# Altium footprint library WE-RJ45 LAN.PcbLib: 101 footprints (part 2 of 7)
Each footprint in its own frame and in the unit in brackets; x right, y up, seen from the top. Pads: shape width x height; smd on the part's side, far side on the other; paste and mask are expansions set on the pad; w line width, h text height; cw(c..) or ccw(c..) is an arc to the next point about the centre after c.
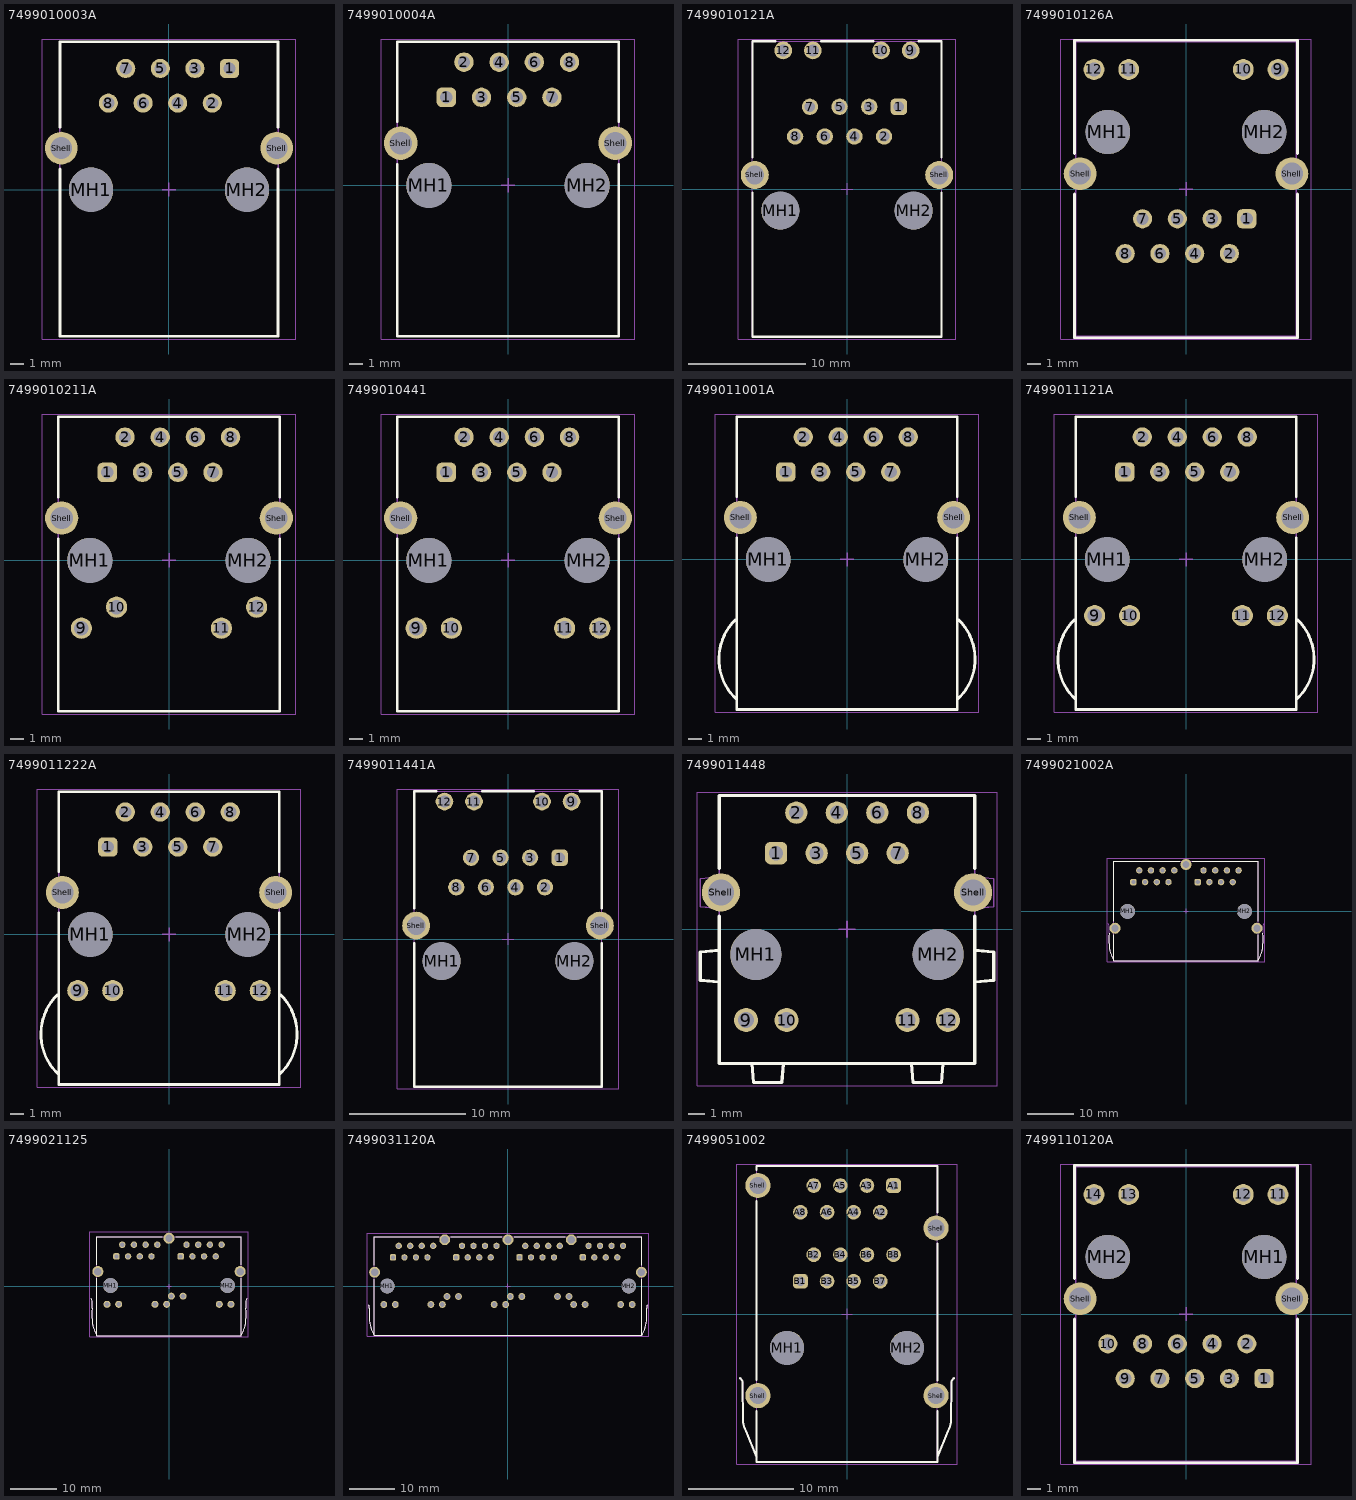
[diagram p1: the footprints below, top view; thin cyan lines are the x and y axes]

## 7499010003A [mm] "LAN Transformer, body 21.84x16.13mm"
height 13.74
pads (12):
  rrect50% 1.4x1.4 hole 0.89: 1(4.445,8.89)
  round 1.4 hole 0.89: 2(3.175,6.35) 3(1.905,8.89) 4(0.635,6.35) 5(-0.635,8.89) 6(-1.905,6.35) 7(-3.175,8.89) 8(-4.445,6.35)
  round 3.25 hole 3.25 unplated: MH1(-5.715,0) MH2(5.715,0)
  round 2.4 hole 1.6: Shell(-7.9,3.05) Shell(7.9,3.05)
Top Overlay:
  lines w0.2: -8,1.52 -8,-10.75 8,-10.75 8,1.52 ; -8,4.58 -8,10.85 8,10.85 8,4.58
Top Assembly:
  lines w0.1: -8,-10.75 -8,10.85 8,10.85 8,-10.75 -8,-10.75
Top Designator:
  text ".Designator" at -3.647,-0.357 h1
Top 3D Body:
  lines w0.1: -8,-10.75 -8,10.85 8,10.85 8,-10.75 -8,-10.75
Top Courtyard:
  lines w0.05: -9.3,-10.95 9.3,-10.95 9.3,11.05 -9.3,11.05 -9.3,-10.95
Top Component Center:
  lines w0.1: -0.5,0 0.5,0 ; 0,-0.5 0,0.5
3D body "7499010003A.stp": height 13.72, standoff -2.88, extent -8.1,-10.75 8.1,10.85

## 7499010004A [mm] "RJ45 LAN Transformer, body 16.00 x 21.25 mm"
height 13.5
pads (12):
  rrect50% 1.4x1.4 hole 0.89: 1(-4.45,6.35)
  round 1.4 hole 0.89: 2(-3.18,8.89) 3(-1.91,6.35) 4(-0.64,8.89) 5(0.63,6.35) 6(1.9,8.89) 7(3.17,6.35) 8(4.44,8.89)
  round 3.25 hole 3.25 unplated: MH1(-5.715,0) MH2(5.715,0)
  round 2.43 hole 1.63: Shell(-7.745,3.05) Shell(7.745,3.05)
Top Overlay:
  lines w0.2: -8,1.5 -8,-10.89 8,-10.89 8,1.5 ; -8,4.6 -8,10.36 8,10.36 8,4.6
Top Assembly:
  lines w0.1: -8,-10.89 -8,10.36 8,10.36 8,-10.89 -8,-10.89
Top Designator:
  text ".Designator" at -3.647,-0.357 h1
Top 3D Body:
  lines w0.1: -8,-10.89 -8,10.36 8,10.36 8,-10.89 -8,-10.89
Top Courtyard:
  lines w0.05: -9.16,-11.09 -9.16,10.56 9.16,10.56 9.16,-11.09 -9.16,-11.09
Top Component Center:
  lines w0.1: -0.5,0 0.5,0 ; 0,-0.5 0,0.5
3D body "7499010004A.stp": height 13.6, standoff -3.5, extent -8.15,-10.89 8.15,10.36

## 7499010121A [mm] "LAN Transformer, body 25.3x16.2mm"
height 13.5
pads (16):
  rrect50% 1.4x1.4 hole 0.9: 1(4.445,7.04)
  round 1.4 hole 0.9: 2(3.175,4.5) 3(1.905,7.04) 4(0.635,4.5) 5(-0.635,7.04) 6(-1.905,4.5) 7(-3.175,7.04) 8(-4.445,4.5)
  round 1.52 hole 1.02: 9(5.465,11.87) 10(2.925,11.87) 11(-2.925,11.87) 12(-5.465,11.87)
  round 3.25 hole 3.25 unplated: MH1(-5.715,-1.85) MH2(5.715,-1.85)
  round 2.4 hole 1.6: Shell(-7.9,1.2) Shell(7.9,1.2)
Top Overlay:
  lines w0.2: -8.1,-0.3 -8.1,-12.65 8.1,-12.65 8.1,-0.3 ; -8.1,2.7 -8.1,12.65 -6.15,12.65 ; -2.2,12.65 2.24,12.65 ; 6.15,12.65 8.1,12.65 8.1,2.7
Top Assembly:
  lines w0.1: -8.1,-12.65 -8.1,12.65 8.1,12.65 8.1,-12.65 -8.1,-12.65
Top Designator:
  text ".Designator" at -3.647,-0.357 h1
Top 3D Body:
  lines w0.1: -8.1,-12.65 -8.1,12.65 8.1,12.65 8.1,-12.65 -8.1,-12.65
Top Courtyard:
  lines w0.05: -9.3,-12.85 9.3,-12.85 9.3,12.85 -9.3,12.85 -9.3,-12.85
Top Component Center:
  lines w0.1: -0.5,0 0.5,0 ; 0,-0.5 0,0.5
3D body "7499010121A.stp": height 13.61, standoff -3.79, extent -8.2,-12.65 8.2,12.65

## 7499010126A [mm] "LAN Transformer, body 21.54 x 16.10 mm"
height 16.65
pads (16):
  rrect50% 1.4x1.4 hole 0.9: 1(4.445,-2.18)
  round 1.4 hole 0.9: 2(3.175,-4.72) 3(1.905,-2.18) 4(0.635,-4.72) 5(-0.635,-2.18) 6(-1.905,-4.72) 7(-3.175,-2.18) 8(-4.445,-4.72)
  round 1.52 hole 1.02: 9(6.73,8.74) 10(4.19,8.74) 11(-4.19,8.74) 12(-6.73,8.74)
  round 3.25 hole 3.25 unplated: MH1(-5.715,4.17) MH2(5.715,4.17)
  round 2.4 hole 1.6: Shell(-7.745,1.12) Shell(7.745,1.12)
Top Overlay:
  lines w0.2: -8.15,-0.36 -8.15,-10.87 8.15,-10.87 8.15,-0.36 ; -8.15,2.6 -8.15,10.87 8.15,10.87 8.15,2.6
Top Assembly:
  lines w0.1: -8.05,-10.77 -8.05,10.77 8.05,10.77 8.05,-10.77 -8.05,-10.77
Top Designator:
  text ".Designator" at -3.647,-0.357 h1
Top 3D Body:
  lines w0.1: -8.05,-10.77 -8.05,10.77 8.05,10.77 8.05,-10.77 -8.05,-10.77
Top Courtyard:
  lines w0.05: -9.145,-10.97 -9.145,10.97 9.145,10.97 9.145,-10.97 -9.145,-10.97
Top Component Center:
  lines w0.1: -0.5,0 0.5,0 ; 0,-0.5 0,0.5
3D body "7499010126A.stp": height 16.69, standoff -3.3, extent -8.34,-10.77 8.34,10.77

## 7499010211A [mm] "Integrated RJ45 Transformer, THT, body 16.00 x 21.25 mm"
height 13.5
pads (16):
  rrect50% 1.4x1.4 hole 0.9: 1(-4.445,6.35)
  round 1.4 hole 0.9: 2(-3.175,8.89) 3(-1.905,6.35) 4(-0.635,8.89) 5(0.635,6.35) 6(1.905,8.89) 7(3.175,6.35) 8(4.445,8.89)
  round 1.53 hole 1.03: 9(-6.325,-4.9) 10(-3.785,-3.38) 11(3.785,-4.9) 12(6.325,-3.38)
  round 3.25 hole 3.25 unplated: MH1(-5.715,0) MH2(5.715,0)
  round 2.4 hole 1.6: Shell(-7.745,3.05) Shell(7.745,3.05)
Top Overlay:
  lines w0.2: -8,1.55 -8,-10.89 8,-10.89 8,1.55 ; -8,4.55 -8,10.36 8,10.36 8,4.55
Top Assembly:
  lines w0.1: -8,-10.89 8,-10.89 8,10.36 -8,10.36 -8,-10.89
Top Designator:
  text ".Designator" at -3.647,-0.357 h1
Top 3D Body:
  lines w0.1: -8,-10.89 8,-10.89 8,10.36 -8,10.36 -8,-10.89
Top Courtyard:
  lines w0.05: -9.145,-11.09 -9.145,10.56 9.145,10.56 9.145,-11.09 -9.145,-11.09
Top Component Center:
  lines w0.1: -0.5,0 0.5,0 ; 0,-0.5 0,0.5
3D body "7499010211A.stp": height 13.5, standoff -3.6, extent -8.15,-10.89 8.15,10.36

## 7499010441 [mm] "Integrated RJ45 Transformer, THT, body 16.00 x 21.25 mm"
height 13.5
pads (16):
  rrect50% 1.4x1.4 hole 0.9: 1(-4.445,6.35)
  round 1.4 hole 0.9: 2(-3.175,8.89) 3(-1.905,6.35) 4(-0.635,8.89) 5(0.635,6.35) 6(1.905,8.89) 7(3.175,6.35) 8(4.445,8.89)
  round 1.53 hole 1.03: 9(-6.625,-4.9) 10(-4.085,-4.9) 11(4.085,-4.9) 12(6.625,-4.9)
  round 3.25 hole 3.25 unplated: MH1(-5.715,0) MH2(5.715,0)
  round 2.4 hole 1.6: Shell(-7.745,3.05) Shell(7.745,3.05)
Top Overlay:
  lines w0.2: -8,1.55 -8,-10.89 8,-10.89 8,1.55 ; -8,4.55 -8,10.36 8,10.36 8,4.55
Top Assembly:
  lines w0.1: -8,-10.89 -8,10.36 8,10.36 8,-10.89 -8,-10.89
Top Designator:
  text ".Designator" at -3.647,-0.357 h1
Top 3D Body:
  lines w0.1: -8,-10.89 -8,10.36 8,10.36 8,-10.89 -8,-10.89
Top Courtyard:
  lines w0.05: -9.145,-11.09 9.145,-11.09 9.145,10.56 -9.145,10.56 -9.145,-11.09
Top Component Center:
  lines w0.1: -0.5,0 0.5,0 ; 0,-0.5 0,0.5
3D body "7499010441.stp": height 13.5, standoff -3.6, extent -8.15,-10.89 8.15,10.36

## 7499011001A [mm] "Integrated RJ45 Transformer, THT, body 16.00 x 21.25 mm"
height 13.5
pads (12):
  rrect50% 1.4x1.4 hole 0.9: 1(-4.445,6.35)
  round 1.4 hole 0.9: 2(-3.175,8.89) 3(-1.905,6.35) 4(-0.635,8.89) 5(0.635,6.35) 6(1.905,8.89) 7(3.175,6.35) 8(4.445,8.89)
  round 3.25 hole 3.25 unplated: MH1(-5.715,0) MH2(5.715,0)
  round 2.4 hole 1.6: Shell(-7.745,3.05) Shell(7.745,3.05)
Top Overlay:
  lines w0.2: -8.099,-4.377 ccw(c-5.31,-7.23) -8.001,-10.176 ; -8,1.55 -8,-10.89 8,-10.89 8,1.55 ; -8,4.55 -8,10.36 8,10.36 8,4.55 ; 8.001,-10.176 ccw(c5.31,-7.23) 8.099,-4.377
Top Assembly:
  lines w0.1: -8.099,-4.377 ccw(c-5.31,-7.23) -8.001,-10.176 ; 8.001,-10.176 ccw(c5.31,-7.23) 8.099,-4.377 ; -8,-10.89 8,-10.89 8,10.36 -8,10.36 -8,-10.89
Top Designator:
  text ".Designator" at -3.647,-0.357 h1
Top 3D Body:
  lines w0.1: -8.099,-4.377 ccw(c-5.31,-7.23) -8.001,-10.176 ; 8.001,-10.176 ccw(c5.31,-7.23) 8.099,-4.377 ; -8,-10.89 8,-10.89 8,10.36 -8,10.36 -8,-10.89
Top Courtyard:
  lines w0.05: -9.548,-11.09 9.548,-11.09 9.548,10.56 -9.548,10.56 -9.548,-11.09
Top Component Center:
  lines w0.1: -0.5,0 0.5,0 ; 0,-0.5 0,0.5
3D body "7499011001A.stp": height 14.85, standoff -3.6, extent -9.348,-10.89 9.348,10.36

## 7499011121A [mm] "LAN Transformer, body 21.84x15.88mm"
height 13.74
pads (16):
  rrect50% 1.4x1.4 hole 0.9: 1(-4.445,6.35)
  round 1.4 hole 0.9: 2(-3.175,8.89) 3(-1.905,6.35) 4(-0.635,8.89) 5(0.635,6.35) 6(1.905,8.89) 7(3.175,6.35) 8(4.445,8.89)
  round 1.53 hole 1.03: 9(-6.63,-4.08) 10(-4.09,-4.08) 11(4.09,-4.08) 12(6.63,-4.08)
  round 3.25 hole 3.25 unplated: MH1(-5.715,0) MH2(5.715,0)
  round 2.4 hole 1.6: Shell(-7.745,3.05) Shell(7.745,3.05)
Top Overlay:
  lines w0.2: -8.099,-4.377 ccw(c-5.31,-7.23) -8.001,-10.176 ; -8,1.55 -8,-10.89 8,-10.89 8,1.55 ; -8,4.55 -8,10.36 8,10.36 8,4.55 ; 8.001,-10.176 ccw(c5.31,-7.23) 8.099,-4.377
Top Assembly:
  lines w0.1: -8.099,-4.377 ccw(c-5.31,-7.23) -8.001,-10.176 ; 8.001,-10.176 ccw(c5.31,-7.23) 8.099,-4.377 ; -8,-10.89 8,-10.89 8,10.36 -8,10.36 -8,-10.89
Top Designator:
  text ".Designator" at -3.647,-0.357 h1
Top 3D Body:
  lines w0.1: -8.099,-4.377 ccw(c-5.31,-7.23) -8.001,-10.176 ; 8.001,-10.176 ccw(c5.31,-7.23) 8.099,-4.377 ; -8,-10.89 8,-10.89 8,10.36 -8,10.36 -8,-10.89
Top Courtyard:
  lines w0.05: -9.548,-11.09 9.548,-11.09 9.548,10.56 -9.548,10.56 -9.548,-11.09
Top Component Center:
  lines w0.1: -0.5,0 0.5,0 ; 0,-0.5 0,0.5
3D body "7499011121A.stp": height 14.9, standoff -3.55, extent -9.348,-10.89 9.348,10.36

## 7499011222A [mm] "Integrated RJ45 Transformer, THT, body 16.00 x 21.25 mm"
height 13.5
pads (16):
  rrect50% 1.4x1.4 hole 0.9: 1(-4.445,6.35)
  round 1.4 hole 0.9: 2(-3.175,8.89) 3(-1.905,6.35) 4(-0.635,8.89) 5(0.635,6.35) 6(1.905,8.89) 7(3.175,6.35) 8(4.445,8.89)
  round 1.53 hole 1.03: 9(-6.625,-4.08) 10(-4.085,-4.08) 11(4.085,-4.08) 12(6.625,-4.08)
  round 3.25 hole 3.25 unplated: MH1(-5.715,0) MH2(5.715,0)
  round 2.4 hole 1.6: Shell(-7.745,3.05) Shell(7.745,3.05)
Top Overlay:
  lines w0.2: -8.099,-4.377 ccw(c-5.31,-7.23) -8.001,-10.176 ; -8,1.55 -8,-10.89 8,-10.89 8,1.55 ; -8,4.55 -8,10.36 8,10.36 8,4.55 ; 8.001,-10.176 ccw(c5.31,-7.23) 8.099,-4.377
Top Assembly:
  lines w0.1: -8.099,-4.377 ccw(c-5.31,-7.23) -8.001,-10.176 ; 8.001,-10.176 ccw(c5.31,-7.23) 8.099,-4.377 ; -8,-10.89 -8,10.36 8,10.36 8,-10.89 -8,-10.89
Top Designator:
  text ".Designator" at -3.647,-0.357 h1
Top 3D Body:
  lines w0.1: -8.099,-4.377 ccw(c-5.31,-7.23) -8.001,-10.176 ; 8.001,-10.176 ccw(c5.31,-7.23) 8.099,-4.377 ; -8,-10.89 -8,10.36 8,10.36 8,-10.89 -8,-10.89
Top Courtyard:
  lines w0.05: -9.548,-11.09 -9.548,10.56 9.548,10.56 9.548,-11.09 -9.548,-11.09
Top Component Center:
  lines w0.1: -0.5,0 0.5,0 ; 0,-0.5 0,0.5
3D body "7499011222A.stp": height 14.85, standoff -3.6, extent -9.348,-10.89 9.348,10.36

## 7499011441A [mm] "LAN Transformer, body 25.3x16.2mm"
height 13.5
pads (16):
  rrect50% 1.4x1.4 hole 0.9: 1(4.445,6.99)
  round 1.4 hole 0.9: 2(3.175,4.45) 3(1.905,6.99) 4(0.635,4.45) 5(-0.635,6.99) 6(-1.905,4.45) 7(-3.175,6.99) 8(-4.445,4.45)
  round 1.52 hole 1.02: 9(5.465,11.82) 10(2.925,11.82) 11(-2.925,11.82) 12(-5.465,11.82)
  round 3.25 hole 3.25 unplated: MH1(-5.715,-1.9) MH2(5.715,-1.9)
  round 2.4 hole 1.6: Shell(-7.9,1.15) Shell(7.9,1.15)
Top Overlay:
  lines w0.2: -8.05,-0.35 -8.05,-12.7 8.05,-12.7 8.05,-0.35 ; -8.05,2.65 -8.05,12.7 -6.15,12.7 ; -2.24,12.7 2.24,12.7 ; 6.15,12.7 8.05,12.7 8.05,2.65
Top Assembly:
  lines w0.1: -8.05,-12.7 8.05,-12.7 8.05,12.7 -8.05,12.7 -8.05,-12.7
Top Designator:
  text ".Designator" at -3.647,-0.357 h1
Top 3D Body:
  lines w0.1: -8.05,-12.7 8.05,-12.7 8.05,12.7 -8.05,12.7 -8.05,-12.7
Top Courtyard:
  lines w0.05: -9.543,-12.9 -9.543,12.9 9.543,12.9 9.543,-12.9 -9.543,-12.9
Top Component Center:
  lines w0.1: -0.5,0 0.5,0 ; 0,-0.5 0,0.5
3D body "7499011441A.stp": height 14.84, standoff -3.25, extent -9.343,-12.7 9.343,12.7

## 7499011448 [mm] "10/100Base-T, THT, 1x1, with shield tabs, LED L-R yellow-green, vertical, ETR"
height 16.9
pads (16):
  rrect50% 1.4x1.4 hole 0.89: 1(-4.445,4.78)
  round 1.4 hole 0.89: 2(-3.175,7.32) 3(-1.905,4.78) 4(-0.635,7.32) 5(0.635,4.78) 6(1.905,7.32) 7(3.175,4.78) 8(4.445,7.32)
  round 1.5 hole 1.02: 9(-6.325,-5.68) 10(-3.785,-5.68) 11(3.785,-5.68) 12(6.325,-5.68)
  round 3.2 hole 3.2 unplated: MH1(-5.715,-1.57) MH2(5.715,-1.57)
  round 2.4 hole 1.63: Shell(-7.9,2.32) Shell(7.9,2.32)
Top Overlay:
  lines w0.2: -9.2,-3.185 -8,-3.29 ; -9.2,-3.18 -9.2,-1.42 ; -9.2,-1.415 -8,-1.31 ; -8,0.83 -8,-8.4 8,-8.4 8,0.83 ; -8,3.83 -8,8.4 8,8.4 8,3.83 ; -5.96,-8.4 -5.855,-9.6 ; -5.85,-9.6 -4.09,-9.6 ; -4.085,-9.6 -3.98,-8.4 ; 4.04,-8.4 4.145,-9.6 ; 4.15,-9.6 5.91,-9.6 ; 5.915,-9.6 6.02,-8.4 ; 8,-3.29 9.2,-3.185 ; 8,-1.31 9.2,-1.415 ; 9.2,-3.18 9.2,-1.42
Top Assembly:
  lines w0.1: -9.2,-3.185 -8,-3.29 ; -9.2,-3.18 -9.2,-1.42 ; -9.2,-1.415 -8,-1.31 ; -9.2,1.415 -8,1.31 ; -9.2,1.42 -9.2,3.18 ; -9.2,3.185 -8,3.29 ; -5.99,-8.4 -5.885,-9.6 ; -5.88,-9.6 -4.12,-9.6 ; -4.115,-9.6 -4.01,-8.4 ; 4.01,-8.4 4.115,-9.6 ; 4.12,-9.6 5.88,-9.6 ; 5.885,-9.6 5.99,-8.4 ; 8,-3.29 9.2,-3.185 ; 8,-1.31 9.2,-1.415 ; 8,1.31 9.2,1.415 ; 8,3.29 9.2,3.185 ; 9.2,-3.18 9.2,-1.42 ; 9.2,1.42 9.2,3.18 ; -8,-8.4 -8,8.4 8,8.4 8,-8.4 -8,-8.4
Top Designator:
  text ".Designator" at -3.647,-0.357 h1
Top 3D Body:
  lines w0.1: -9.2,-3.185 -8,-3.29 ; -9.2,-3.18 -9.2,-1.42 ; -9.2,-1.415 -8,-1.31 ; -9.2,1.415 -8,1.31 ; -9.2,1.42 -9.2,3.18 ; -9.2,3.185 -8,3.29 ; -5.99,-8.4 -5.885,-9.6 ; -5.88,-9.6 -4.12,-9.6 ; -4.115,-9.6 -4.01,-8.4 ; 4.01,-8.4 4.115,-9.6 ; 4.12,-9.6 5.88,-9.6 ; 5.885,-9.6 5.99,-8.4 ; 8,-3.29 9.2,-3.185 ; 8,-1.31 9.2,-1.415 ; 8,1.31 9.2,1.415 ; 8,3.29 9.2,3.185 ; 9.2,-3.18 9.2,-1.42 ; 9.2,1.42 9.2,3.18 ; -8,-8.4 8,-8.4 8,8.4 -8,8.4 -8,-8.4
Top Courtyard:
  lines w0.05: -9.4,-9.799 9.4,-9.799 9.4,8.6 -9.4,8.6 -9.4,-9.799
Top Component Center:
  lines w0.1: -0.5,0 0.5,0 ; 0,-0.5 0,0.5
3D body "7499011448.stp": height 16.95, standoff -3.45, extent -9.2,-9.599 9.2,8.4

## 7499021002A [mm] "LAN Transformer, body 31.4x21.59mm"
height 15.21
pads (21):
  rrect50% 1.4x1.4 hole 0.9: A1(-11.43,6.305) B1(2.54,6.305)
  round 1.4 hole 0.9: A2(-10.16,8.845) A3(-8.89,6.305) A4(-7.62,8.845) A5(-6.35,6.305) A6(-5.08,8.845) A7(-3.81,6.305) A8(-2.54,8.845) B2(3.81,8.845) B3(5.08,6.305) B4(6.35,8.845) B5(7.62,6.305) B6(8.89,8.845) B7(10.16,6.305) B8(11.43,8.845)
  round 3.25 hole 3.25 unplated: MH1(-12.7,-0.045) MH2(12.7,-0.045)
  round 2.4 hole 1.6: Shell(-15.43,-3.725) Shell(0,10.115) Shell(15.43,-3.725)
Top Overlay:
  lines w0.2: -16.713,-4.767 ccw(c-13.098,-5.207) -16.74,-5.237 ccw(c7.924,-6.065) -16.669,-8.109 ccw(c-8.25,-6.59) -15.7,-10.795 ; -15.7,-5.195 -15.7,-10.795 ; -15.7,-2.255 -15.7,10.795 -1.35,10.795 ; 1.35,10.795 15.7,10.795 15.7,-2.255 ; 15.7,-5.195 15.7,-10.795 ; 16.713,-4.767 cw(c13.098,-5.207) 16.74,-5.237 cw(c-7.924,-6.065) 16.669,-8.109 cw(c8.25,-6.59) 15.7,-10.795 ; -15.7,-10.795 15.7,-10.795
Top Assembly:
  lines w0.1: -16.862,-2.686 cw(c-17.973,-3.298) -16.706,-3.355 -16.713,-4.767 ccw(c-13.098,-5.207) -16.74,-5.237 ccw(c7.924,-6.065) -16.669,-8.109 ccw(c-8.25,-6.59) -15.7,-10.795 ; 16.862,-2.686 ccw(c17.973,-3.298) 16.706,-3.355 16.713,-4.767 cw(c13.098,-5.207) 16.74,-5.237 cw(c-7.924,-6.065) 16.669,-8.109 cw(c8.25,-6.59) 15.7,-10.795 ; -15.7,-10.795 -15.7,10.795 15.7,10.795 15.7,-10.795 ; -15.7,-10.795 15.7,-10.795
Top Designator:
  text ".Designator" at -3.647,-0.357 h1
Top 3D Body:
  lines w0.1: -16.862,-2.686 cw(c-17.973,-3.298) -16.706,-3.355 -16.713,-4.767 ccw(c-13.098,-5.207) -16.74,-5.237 ccw(c7.924,-6.065) -16.669,-8.109 ccw(c-8.25,-6.59) -15.7,-10.795 ; 16.862,-2.686 ccw(c17.973,-3.298) 16.706,-3.355 16.713,-4.767 cw(c13.098,-5.207) 16.74,-5.237 cw(c-7.924,-6.065) 16.669,-8.109 cw(c8.25,-6.59) 15.7,-10.795 ; -15.7,-10.795 -15.7,10.795 15.7,10.795 15.7,-10.795 ; -15.7,-10.795 15.7,-10.795
Top Courtyard:
  lines w0.05: -17.16,-10.995 17.16,-10.995 17.16,11.515 -17.16,11.515 -17.16,-10.995
Top Component Center:
  lines w0.1: -0.5,0 0.5,0 ; 0,-0.5 0,0.5
3D body "7499021002A.stp": height 15.48, standoff -4.66, extent -16.799,-10.795 16.798,10.795

## 7499021125 [mm] "LAN Transformer, body 31.4x21.5mm"
height 15.21
pads (29):
  rrect50% 1.4x1.4 hole 0.89: A1(-11.43,6.5) B1(2.54,6.5)
  round 1.4 hole 0.89: A2(-10.16,9.04) A3(-8.89,6.5) A4(-7.62,9.04) A5(-6.35,6.5) A6(-5.08,9.04) A7(-3.81,6.5) A8(-2.54,9.04) B2(3.81,9.04) B3(5.08,6.5) B4(6.35,9.04) B5(7.62,6.5) B6(8.89,9.04) B7(10.16,6.5) B8(11.43,9.04)
  round 1.52 hole 1.02: A9(-13.47,-3.91) A10(-10.93,-3.91) A11(-3.05,-3.91) A12(-0.51,-3.91) B9(0.51,-2.14) B10(3.05,-2.14) B11(10.93,-3.91) B12(13.47,-3.91)
  round 3.25 hole 3.25 unplated: MH1(-12.7,0.15) MH2(12.7,0.15)
  round 2.4 hole 1.63: Shell(-15.465,3.2) Shell(0,10.44) Shell(15.465,3.2)
Top Overlay:
  lines w0.2: -16.862,-2.641 cw(c-17.973,-3.253) -16.706,-3.31 -16.713,-4.722 ccw(c-13.098,-5.162) -16.74,-5.192 ccw(c7.924,-6.02) -16.669,-8.064 ccw(c-8.25,-6.545) -15.7,-10.75 ; -15.7,1.7 -15.7,-10.75 ; -15.7,4.7 -15.7,10.75 -1.45,10.75 ; 1.45,10.75 15.7,10.75 15.7,4.7 ; 15.7,1.7 15.7,-10.75 ; 16.862,-2.641 ccw(c17.973,-3.253) 16.706,-3.31 16.713,-4.722 cw(c13.098,-5.162) 16.74,-5.192 cw(c-7.924,-6.02) 16.669,-8.064 cw(c8.25,-6.545) 15.7,-10.75 ; -15.7,-10.75 15.7,-10.75
Top Assembly:
  lines w0.1: -16.862,-2.641 cw(c-17.973,-3.253) -16.706,-3.31 -16.713,-4.722 ccw(c-13.098,-5.162) -16.74,-5.192 ccw(c7.924,-6.02) -16.669,-8.064 ccw(c-8.25,-6.545) -15.7,-10.75 ; 16.862,-2.641 ccw(c17.973,-3.253) 16.706,-3.31 16.713,-4.722 cw(c13.098,-5.162) 16.74,-5.192 cw(c-7.924,-6.02) 16.669,-8.064 cw(c8.25,-6.545) 15.7,-10.75 ; -15.7,-10.75 15.7,-10.75 ; -15.7,-10.75 -15.7,10.75 15.7,10.75 15.7,-10.75
Top Designator:
  text ".Designator" at -3.647,-0.357 h1
Top 3D Body:
  lines w0.1: -16.862,-2.641 cw(c-17.973,-3.253) -16.706,-3.31 -16.713,-4.722 ccw(c-13.098,-5.162) -16.74,-5.192 ccw(c7.924,-6.02) -16.669,-8.064 ccw(c-8.25,-6.545) -15.7,-10.75 ; 16.862,-2.641 ccw(c17.973,-3.253) 16.706,-3.31 16.713,-4.722 cw(c13.098,-5.162) 16.74,-5.192 cw(c-7.924,-6.02) 16.669,-8.064 cw(c8.25,-6.545) 15.7,-10.75 ; -15.7,-10.75 15.7,-10.75 ; -15.7,-10.75 -15.7,10.75 15.7,10.75 15.7,-10.75
Top Courtyard:
  lines w0.05: -17.2,-10.95 -17.2,11.84 17.2,11.84 17.2,-10.95 -17.2,-10.95
Top Component Center:
  lines w0.1: -0.5,0 0.5,0 ; 0,-0.5 0,0.5
3D body "7499021125.stp": height 14.81, standoff -3.66, extent -16.923,-10.75 16.923,10.75

## 7499031120A [mm] "LAN Transformer, body 59.13x21.8mm"
height 13.5
pads (55):
  rrect50% 1.4x1.4 hole 0.89: A1(-25.4,6.35) B1(-11.43,6.35) C1(2.54,6.35) D1(16.51,6.35)
  round 1.4 hole 0.89: A2(-24.13,8.89) A3(-22.86,6.35) A4(-21.59,8.89) A5(-20.32,6.35) A6(-19.05,8.89) A7(-17.78,6.35) A8(-16.51,8.89) B2(-10.16,8.89) B3(-8.89,6.35) B4(-7.62,8.89) B5(-6.35,6.35) B6(-5.08,8.89) B7(-3.81,6.35) B8(-2.54,8.89) C2(3.81,8.89) C3(5.08,6.35) C4(6.35,8.89) C5(7.62,6.35) C6(8.89,8.89) C7(10.16,6.35) C8(11.43,8.89) D2(17.78,8.89) D3(19.05,6.35) D4(20.32,8.89) D5(21.59,6.35) D6(22.86,8.89) D7(24.13,6.35) D8(25.4,8.89)
  round 1.52 hole 1.02: A9(-27.42,-4.06) A10(-24.88,-4.06) A11(-17.02,-4.06) A12(-14.48,-4.06) B9(-13.46,-2.29) B10(-10.92,-2.29) B11(-3.05,-4.06) B12(-0.51,-4.06) C9(0.51,-2.29) C10(3.05,-2.29) C11(10.92,-2.29) C12(13.46,-2.29) D9(14.48,-4.06) D10(17.02,-4.06) D11(24.88,-4.06) D12(27.42,-4.06)
  round 3.25 hole 3.25 unplated: MH1(-26.67,0) MH2(26.67,0)
  round 2.4 hole 1.63: Shell(-29.455,3.05) Shell(-13.97,10.24) Shell(0,10.24) Shell(13.97,10.24) Shell(29.455,3.05)
Top Overlay:
  lines w0.2: -30.734,-4.193 cw(c-31.845,-4.805) -30.578,-4.862 ccw(c-26.963,-5.302) -30.605,-5.332 ccw(c-5.941,-6.16) -30.534,-8.204 ccw(c-22.115,-6.685) -29.565,-10.89 ; -29.565,1.55 -29.565,-10.9 29.565,-10.9 29.565,1.55 ; -29.565,4.55 -29.565,10.9 -15.315,10.9 ; -12.625,10.9 -1.335,10.9 ; 1.335,10.9 12.625,10.9 ; 15.315,10.9 29.565,10.9 29.565,4.55 ; 29.565,-10.89 ccw(c22.115,-6.685) 30.534,-8.204 ccw(c5.941,-6.16) 30.605,-5.332 ccw(c26.963,-5.302) 30.578,-4.862 cw(c31.845,-4.805) 30.734,-4.193
Top Assembly:
  lines w0.1: -30.734,-4.193 cw(c-31.845,-4.805) -30.578,-4.862 ccw(c-26.963,-5.302) -30.605,-5.332 ccw(c-5.941,-6.16) -30.534,-8.204 ccw(c-22.115,-6.685) -29.565,-10.89 ; 29.565,-10.89 ccw(c22.115,-6.685) 30.534,-8.204 ccw(c5.941,-6.16) 30.605,-5.332 ccw(c26.963,-5.302) 30.578,-4.862 cw(c31.845,-4.805) 30.734,-4.193 ; -29.565,-10.9 -29.565,10.9 29.565,10.9 29.565,-10.9 -29.565,-10.9
Top Designator:
  text ".Designator" at -3.647,-0.357 h1
Top 3D Body:
  lines w0.1: -30.734,-4.193 cw(c-31.845,-4.805) -30.578,-4.862 ccw(c-26.963,-5.302) -30.605,-5.332 ccw(c-5.941,-6.16) -30.534,-8.204 ccw(c-22.115,-6.685) -29.565,-10.89 ; 29.565,-10.89 ccw(c22.115,-6.685) 30.534,-8.204 ccw(c5.941,-6.16) 30.605,-5.332 ccw(c26.963,-5.302) 30.578,-4.862 cw(c31.845,-4.805) 30.734,-4.193 ; -29.565,-10.9 -29.565,10.9 29.565,10.9 29.565,-10.9 -29.565,-10.9
Top Courtyard:
  lines w0.05: -31.034,-11.1 31.034,-11.1 31.034,11.64 -31.034,11.64 -31.034,-11.1
Top Component Center:
  lines w0.1: -0.5,0 0.5,0 ; 0,-0.5 0,0.5
3D body "7499031120A.stp": height 14.78, standoff -3.88, extent -30.788,-10.9 30.788,10.9

## 7499051002 [mm] "LAN Transformer, body 28.25x17.27mm"
height 25.2
pads (22):
  rrect50% 1.4x1.4 hole 0.89: A1(4.445,12.265) B1(-4.445,3.125)
  round 1.4 hole 0.89: A2(3.175,9.725) A3(1.905,12.265) A4(0.635,9.725) A5(-0.635,12.265) A6(-1.905,9.725) A7(-3.175,12.265) A8(-4.445,9.725) B2(-3.175,5.665) B3(-1.905,3.125) B4(-0.635,5.665) B5(0.635,3.125) B6(1.905,5.665) B7(3.175,3.125) B8(4.445,5.665)
  round 3.25 hole 3.25 unplated: MH1(-5.715,-3.225) MH2(5.715,-3.225)
  round 2.4 hole 1.6: Shell(-8.51,-7.795) Shell(-8.51,12.275) Shell(8.51,-7.795) Shell(8.51,8.205)
Top Overlay:
  lines w0.2: -10.218,-6.134 cw(c-10.455,-6.555) -9.972,-6.555 ; -9.975,-6.505 -9.933,-10.32 ; -9.94,-10.321 ccw(c-7.312,-9.899) -9.643,-11.184 -8.639,-13.667 ; -8.635,-9.275 -8.635,-14.125 8.635,-14.125 8.635,-9.275 ; -8.635,-6.315 -8.635,10.775 ; -8.635,13.775 -8.635,14.125 8.635,14.125 8.635,9.675 ; 8.635,-6.325 8.635,6.725 ; 8.639,-13.667 9.643,-11.184 ccw(c7.312,-9.899) 9.94,-10.321 ; 9.933,-10.32 9.975,-6.505 ; 9.972,-6.555 cw(c10.455,-6.555) 10.218,-6.134
Top Assembly:
  lines w0.1: -10.218,-6.134 cw(c-10.455,-6.555) -9.972,-6.555 ; -9.975,-6.505 -9.933,-10.32 ; -9.94,-10.321 ccw(c-7.312,-9.899) -9.643,-11.184 -8.639,-13.667 ; 8.639,-13.667 9.643,-11.184 ccw(c7.312,-9.899) 9.94,-10.321 ; 9.933,-10.32 9.975,-6.505 ; 9.972,-6.555 cw(c10.455,-6.555) 10.218,-6.134 ; -8.635,-14.125 8.635,-14.125 8.635,14.125 -8.635,14.125 -8.635,-14.125
Top Designator:
  text ".Designator" at -3.647,-0.357 h1
Top 3D Body:
  lines w0.1: -10.218,-6.134 cw(c-10.455,-6.555) -9.972,-6.555 ; -9.975,-6.505 -9.933,-10.32 ; -9.94,-10.321 ccw(c-7.312,-9.899) -9.643,-11.184 -8.639,-13.667 ; 8.639,-13.667 9.643,-11.184 ccw(c7.312,-9.899) 9.94,-10.321 ; 9.933,-10.32 9.975,-6.505 ; 9.972,-6.555 cw(c10.455,-6.555) 10.218,-6.134 ; -8.635,-14.125 8.635,-14.125 8.635,14.125 -8.635,14.125 -8.635,-14.125
Top Courtyard:
  lines w0.05: -10.519,-14.325 -10.519,14.325 10.519,14.325 10.519,-14.325 -10.519,-14.325
Top Component Center:
  lines w0.1: -0.5,0 0.5,0 ; 0,-0.5 0,0.5
3D body "7499051002.stp": height 26.87, standoff -3.75, extent -10.306,-14.125 10.306,14.125

## 7499110120A [mm] "LAN Transformer, body 21.54 x 16.10 mm"
height 16.65
pads (18):
  rrect50% 1.4x1.4 hole 0.9: 1(5.715,-4.72)
  round 1.4 hole 0.9: 2(4.445,-2.18) 3(3.175,-4.72) 4(1.905,-2.18) 5(0.635,-4.72) 6(-0.635,-2.18) 7(-1.905,-4.72) 8(-3.175,-2.18) 9(-4.445,-4.72) 10(-5.715,-2.18)
  round 1.52 hole 1.02: 11(6.73,8.74) 12(4.19,8.74) 13(-4.19,8.74) 14(-6.73,8.74)
  round 3.25 hole 3.25 unplated: MH1(5.715,4.17) MH2(-5.715,4.17)
  round 2.4 hole 1.6: Shell(-7.745,1.12) Shell(7.745,1.12)
Top Overlay:
  lines w0.2: -8.15,-0.36 -8.15,-10.87 8.15,-10.87 8.15,-0.36 ; -8.15,2.6 -8.15,10.87 8.15,10.87 8.15,2.6
Top Assembly:
  lines w0.1: -8.05,-10.77 8.05,-10.77 8.05,10.77 -8.05,10.77 -8.05,-10.77
Top Designator:
  text ".Designator" at -3.647,-0.357 h1
Top 3D Body:
  lines w0.1: -8.05,-10.77 8.05,-10.77 8.05,10.77 -8.05,10.77 -8.05,-10.77
Top Courtyard:
  lines w0.05: -9.145,-10.97 9.145,-10.97 9.145,10.97 -9.145,10.97 -9.145,-10.97
Top Component Center:
  lines w0.1: -0.5,0 0.5,0 ; 0,-0.5 0,0.5
3D body "7499110120A.stp": height 16.69, standoff -3.3, extent -8.34,-10.77 8.34,10.77